# Altium schematic symbol library 3PH_EMI_Filter.SchLib: 1 symbol
Pins are listed as number, name and electrical type; pins without a type are passive.

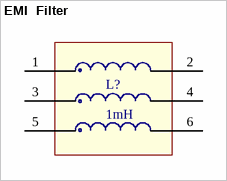
[diagram p0: symbol EMI  Filter]

## EMI  Filter
designator L?, comment 1mH
Three-Phase EMI Common Mode Filter Inductor 1mh-5mh
footprint 3PH_filter inductor 2mH 60A (High-current EMI EMC nanocrystalline amorphous three-phase common mode filter inductor 2mH 60A horizontal base plate)
pins: 1 0, 2 0, 3 0, 4 0, 5 0, 6 0